# EAGLE library part SN74AVC4T774PW_SN74AVC4T774PW (library HA_FONA_LARA_20)
Check prices <https://pricing.snapeda.com/search/part/SN74AVC4T774PW/?ref=eda>
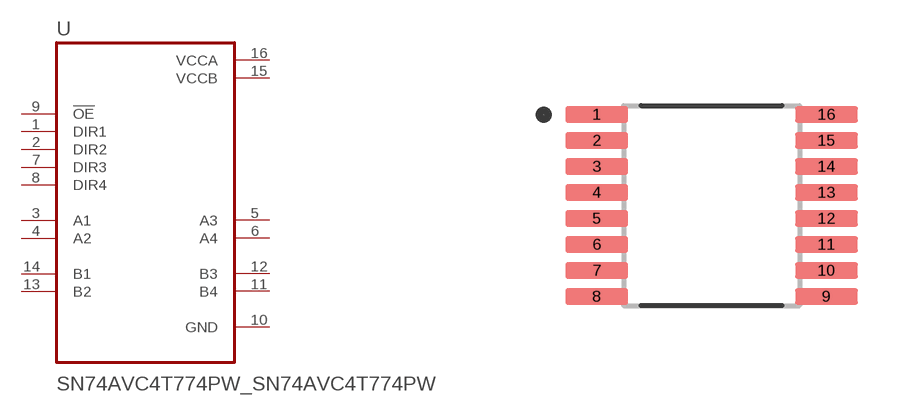
[diagram p7: symbol with the pads of SN74AVC4T774PW_SOP65P640X120-16N; footprint SN74AVC4T774PW_SOP65P640X120-16N]

Designator prefix U

## SN74AVC4T774PW_SN74AVC4T774PW (AVAILABILITY: Good; DESCRIPTION: 4-bit dual-supply bus transceiver with configurable voltage-level shifting and 3-state outputs 16-TSSOP -40 to 85; MF: Texas Instruments; MP: SN74AVC4T774PW; PACKAGE: TSSOP-16 Texas Instruments; PRICE: None; PURCHASE-URL: https://pricing.snapeda.com/search/part/SN74AVC4T774PW/?ref=eda)  [SN74AVC4T774PW_SOP65P640X120-16N]
1  DIR1  in
2  DIR2  in
3  A1
4  A2
5  A3
6  A4
7  DIR3  in
8  DIR4  in
9  !OE  in
10  GND  pwr
11  B4
12  B3
13  B2
14  B1
15  VCCB  pwr
16  VCCA  pwr

## Footprint SN74AVC4T774PW_SOP65P640X120-16N (pad centres in mm)
smd 1.57 x 0.41: 1 -2.87,2.275; 2 -2.87,1.625; 3 -2.87,0.975; 4 -2.87,0.325; 5 -2.87,-0.325; 6 -2.87,-0.975; 7 -2.87,-1.625; 8 -2.87,-2.275; 9 2.87,-2.275; 10 2.87,-1.625; 11 2.87,-0.975; 12 2.87,-0.325; 13 2.87,0.325; 14 2.87,0.975; 15 2.87,1.625; 16 2.87,2.275